# Altium schematic symbol library Capacitor.SchLib: 735 symbols (part 18 of 20)
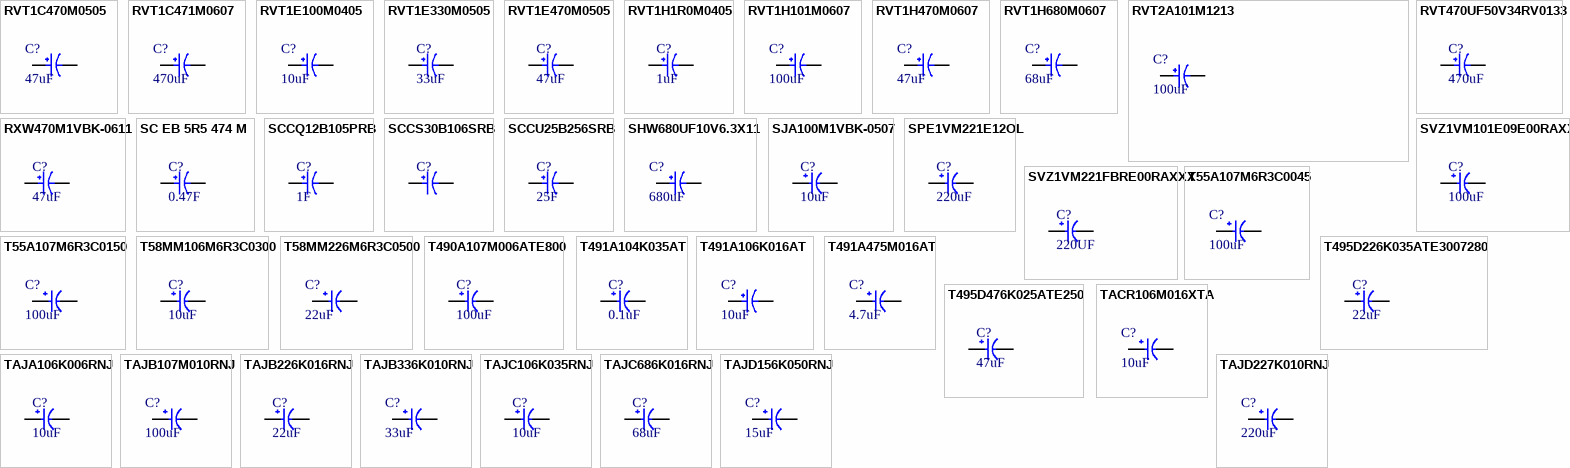
[diagram p35: symbols RVT1C470M0505 to TAJD227K010RNJ]

## SCCU25B256SRB
designator C?, comment 25F
CAP 25F -10% +30% 2.7V T/H; Manufacturer: Kyocera AVX; Manufacturer Part Number: SCCU25B256SRB; Tolerance: 30%; ESR (Equivalent Series Resistance): 27mR; Item Type: Supercapacitor; Supplier: Digikey; Supplier Part Number: 478-10018-ND; RoHS: Yes; Category: Capacitors; Stock: 10511; Pricing: 1=2.52, 10=1.937, 50=1.7798, 100=1.4758, 500=1.18656, 1000=1.03824, 2500=1.00116, 5000=0.96408 (USD); Mounting Technology: Through Hole; Case/Package: Radial; Min Operating Temperature: -40°C; Max Operating Temperature: 65°C; Packaging: Bulk; Value: 25F; Voltage Rating: 2.7V; Termination: PC Pins; Series: SCC; RoHS Compliant: Yes; ComponentLink1URL: http://datasheets.avx.com/AVX-SCC.pdf?src-supplier=Digikey; ComponentLink1Description: http://datasheets.avx.com/AVX-SCC.pdf?src-supplier=Digikey; ComponentLink2URL: https://datasheet.octopart.com/SCCU25B256SRB-KYOCERA-AVX-datasheet-157240974.pdf?src-supplier=TME; ComponentLink2Description: https://datasheet.octopart.com/SCCU25B256SRB-KYOCERA-AVX-datasheet-157240974.pdf?src-supplier=TME
footprint SCCU25B256SRB
pins: 1, 2

## SHW680UF10V6.3X11
designator C?, comment 680uF
680uF 10V 50mΩ@300kHz ±20% 980mA@100kHz Plugin,D6.3xL11mm Aluminum Electrolytic Capacitors - Leaded ROHS; Manufacturer: KNSCHA; Manufacturer Part Number: SHW680UF10V6.3X11; Package: Plugin,D6.3xL11mm; LCSC Part Number: C494547; Item Type: Electrolytic Capacitor; ComponentLink1Description: LCSC; ComponentLink1URL: https://www.lcsc.com/product-detail/Aluminum-Electrolytic-Capacitors-Leaded_KNSCHA-SHW680UF10V6-3X11_C494547.html
footprint SHW680UF10V6.3X11
pins: 1, 2

## SJA100M1VBK-0507
designator C?, comment 10uF
10uF 35V ±20% 30mA@120Hz Plugin,D5xL7mm Aluminum Electrolytic Capacitors - Leaded ROHS; Manufacturer: Lelon; Manufacturer Part Number: SJA100M1VBK-0507; Package: C134710; LCSC Part Number: Plugin,D5xL7mm; Item Type: Capacitor; ComponentLink1Description: LCSC; ComponentLink1URL: https://www.lcsc.com/product-detail/Aluminum-Electrolytic-Capacitors-Leaded_Lelon-SJA100M1VBK-0507_C134710.html
footprint SJA100M1VBK-0507
pins: 1, 2

## SPE1VM221E12OL
designator C?, comment 220uF
35V 220uF ±20% Plugin,D6.3xL12mm Polymer Aluminum Capacitors ROHS; Manufacturer: Yunxing; Manufacturer Part Number: SPE1VM221E12OL; Package: Plugin,D6.3xL12mm; LCSC Part Number: C698133; Item Type: Capacitor; ComponentLink1Description: LCSC; ComponentLink1URL: https://www.lcsc.com/product-detail/Polymer-Aluminum-Capacitors_Yunxing-SPE1VM221E12OL_C698133.html?s_z=n_SPE1VM221E12OL
footprint SPE1VM221E12OL
pins: 1, 2

## SVZ1VM101E09E00RAXXX
designator C?, comment 100uF
35V 100uF Polymer ±20% SMD,D6.3xL9mm Polymer Aluminum Capacitors ROHS; Manufacturer: KNSCHA; Manufacturer Part Number: SVZ1VM101E09E00RAXXX; Package: SMD,D6.3xL9mm; LCSC Part Number: C2939795; Item Type: Capacitor; ComponentLink1Description: LCSC; ComponentLink1URL: https://www.lcsc.com/product-detail/Polymer-Aluminum-Capacitors_AISHI-Aihua-Group-SVZ1VM101E09E00RAXXX_C2939795.html
footprint SVZ1VM101E09E00RAXXX
pins: 1, 2

## SVZ1VM221FBRE00RAXXX
designator C?, comment 220UF
35V 220uF ±20% 30mΩ@100kHz 2.4A@100kHz SMD,D8xL11.5mm Polymer Aluminum Capacitors ROHS; Manufacturer: KNSCHA; Manufacturer Part Number: SVZ1VM221FBRE00RAXXX; Package: SMD,D8xL11.5mm; LCSC Part Number: C2923769; Item Type: Capacitor; ComponentLink1Description: LCSC; ComponentLink1URL: https://www.lcsc.com/product-detail/Polymer-Aluminum-Capacitors_AISHI-Aihua-Group-SVZ1VM221FBRE00RAXXX_C2923769.html
footprint SVZ1VM221FBRE00RAXXX
pins: 1, 2

## T55A107M6R3C0045
designator C?, comment 100uF
CAP TANT POLY 100UF 6.3V 1206; Manufacturer: Vishay; Manufacturer Part Number: T55A107M6R3C0045; Item Type: Tantalum Capacitors; Supplier: Mouser; LCSC Part Number: C2158564; RoHS: Yes; Stock: 8813; Pricing: 1=0.87, 10=0.425, 50=0.425, 100=0.425, 1000=0.361, 10000=0.31 (USD); Voltage Rating (DC): 6.3V; ComponentLink1URL: http://www.farnell.com/datasheets/2896948.pdf?src-supplier=Farnell; ComponentLink1Description: http://www.farnell.com/datasheets/2896948.pdf?src-supplier=Farnell; ComponentLink2URL: https://datasheet.octopart.com/T55A107M6R3C0045-Vishay-datasheet-112277755.pdf?src-supplier=Newark; ComponentLink2Description: https://datasheet.octopart.com/T55A107M6R3C0045-Vishay-datasheet-112277755.pdf?src-supplier=Newark; ComponentLink3URL: https://datasheet.octopart.com/T55A107M6R3C0045-Vishay-datasheet-76796260.pdf?src-supplier=Element14; ComponentLink3Description: https://datasheet.octopart.com/T55A107M6R3C0045-Vishay-datasheet-76796260.pdf?src-supplier=Element14; ComponentLink4URL: http://www.farnell.com/datasheets/2896948.pdf?src-supplier=Newark; ComponentLink4Description: http://www.farnell.com/datasheets/2896948.pdf?src-supplier=Newark; ComponentLink5URL: https://datasheet.octopart.com/T55A107M6R3C0045-Vishay-datasheet-32736835.pdf?src-supplier=Future+Electronics; ComponentLink5Description: https://datasheet.octopart.com/T55A107M6R3C0045-Vishay-datasheet-32736835.pdf?src-supplier=Future+Electronics; ComponentLink6URL: http://www.vishay.com/docs/40174/t55.pdf?src-supplier=Digikey; ComponentLink6Description: http://www.vishay.com/docs/40174/t55.pdf?src-supplier=Digikey
footprint Case-A
pins: 1, 2

## T55A107M6R3C0150
designator C?, comment 100uF
CAP TANT POLY 100UF 6.3V 1206; Manufacturer: Vishay Sprague; Manufacturer Part Number: T55A107M6R3C0150; Item Type: Capacitor; Supplier: Digi-Key; Supplier Part Number: 718-1988-1-ND; RoHS: Yes; Category: Tantalum Capacitors; Stock: 2047; Pricing: 1=0.79, 10=0.583, 50=0.4664, 100=0.3997, 500=0.31644, 1000=0.26648 (USD); ComponentLink1URL: https://datasheet.ciiva.com/48510/t55-48510541.pdf?src-supplier=Avnet; ComponentLink1Description: https://datasheet.ciiva.com/48510/t55-48510541.pdf?src-supplier=Avnet; ComponentLink2URL: https://datasheet.ciiva.com/48510/t55-48510543.pdf?src-supplier=Avnet; ComponentLink2Description: https://datasheet.ciiva.com/48510/t55-48510543.pdf?src-supplier=Avnet; LCSC Part Number: C2158718
footprint Case-A
pins: 1, 2

## T58MM106M6R3C0300
designator C?, comment 10uF
CAP TANT POLY 10UF 6.3V 0603; Manufacturer: Vishay; Manufacturer Part Number: T58MM106M6R3C0300; ESR (Equivalent Series Resistance): 300mR; Tolerance: 20%; Item Type: Capacitor; Supplier: Digi-Key; Supplier Part Number: 718-2111-1-ND; RoHS: Yes; Category: Tantalum Capacitors; Stock: 738; Pricing: 1=0.69, 10=0.462, 50=0.3676, 100=0.3035, 500=0.23714, 1000=0.20158 (USD); Mounting Technology: Surface Mount; Case/Package: 0603; Case Code (Metric): 1608; Case Code (Imperial): 0603; Min Operating Temperature: -55°C; Max Operating Temperature: 105°C; Packaging: Cut Tape; Value: 10uF; Voltage Rating: 6.3V; Voltage Rating (DC): 6.3V; Features: General Purpose; Series: vPolyTan™ T58; Construction: Flat; Length: 1.6mm; Depth: 0.85mm; RoHS Compliant: Yes; Reach SVHC Compliant: Unknown; ComponentLink1URL: http://www.farnell.com/datasheets/2699706.pdf?src-supplier=Farnell; ComponentLink1Description: http://www.farnell.com/datasheets/2699706.pdf?src-supplier=Farnell; ComponentLink2URL: http://www.vishay.com/docs/40189/t58.pdf?src-supplier=Avnet; ComponentLink2Description: http://www.vishay.com/docs/40189/t58.pdf?src-supplier=Avnet; ComponentLink3URL: http://www.farnell.com/datasheets/2028130.pdf?src-supplier=Element14; ComponentLink3Description: http://www.farnell.com/datasheets/2028130.pdf?src-supplier=Element14; ComponentLink4URL: http://www.vishay.com/docs/40189/t58.pdf?src-supplier=Digi-Key; ComponentLink4Description: http://www.vishay.com/docs/40189/t58.pdf?src-supplier=Digi-Key; LCSC Part Number: C2158420
footprint Tant-0603
pins: 1, 2

## T58MM226M6R3C0500
designator C?, comment 22uF
CAP TANT POLY 22UF 6.3V 0603; Manufacturer: Vishay; Manufacturer Part Number: T58MM226M6R3C0500; Item Type: Capacitor; Supplier: Mouser; Supplier Part Number: 74-T58MM226M6R3C0500; RoHS: Yes; Category: Tantalum Capacitors; Stock: 4661; Pricing: 1=0.71, 10=0.379, 50=0.379, 100=0.313, 1000=0.208, 10000=0.168 (USD); ComponentLink1URL: http://www.farnell.com/datasheets/2617265.pdf?src-supplier=Farnell; ComponentLink1Description: http://www.farnell.com/datasheets/2617265.pdf?src-supplier=Farnell; ComponentLink2URL: https://datasheet.octopart.com/T58MM226M6R3C0500-Vishay-datasheet-78835337.pdf?src-supplier=Element14; ComponentLink2Description: https://datasheet.octopart.com/T58MM226M6R3C0500-Vishay-datasheet-78835337.pdf?src-supplier=Element14; ComponentLink3URL: https://datasheet.octopart.com/T58MM226M6R3C0500.-Vishay-datasheet-159617154.pdf?src-supplier=Newark; ComponentLink3Description: https://datasheet.octopart.com/T58MM226M6R3C0500.-Vishay-datasheet-159617154.pdf?src-supplier=Newark; ComponentLink4URL: http://www.farnell.com/datasheets/2617265.pdf?src-supplier=Newark; ComponentLink4Description: http://www.farnell.com/datasheets/2617265.pdf?src-supplier=Newark; ComponentLink5URL: http://www.vishay.com/docs/40189/t58.pdf?src-supplier=Avnet; ComponentLink5Description: http://www.vishay.com/docs/40189/t58.pdf?src-supplier=Avnet; ComponentLink6URL: https://datasheet.octopart.com/T58MM226M6R3C0500-Vishay-datasheet-95510002.pdf?src-supplier=Future+Electronics; ComponentLink6Description: https://datasheet.octopart.com/T58MM226M6R3C0500-Vishay-datasheet-95510002.pdf?src-supplier=Future+Electronics; ComponentLink7URL: https://www.vishay.com/docs/40189/t58.pdf?src-supplier=Digi-Key; ComponentLink7Description: https://www.vishay.com/docs/40189/t58.pdf?src-supplier=Digi-Key; Package: 0603; LCSC Part Number: C2158410; ComponentLink8Description: LCSC; ComponentLink8URL: https://www.lcsc.com/product-detail/Tantalum-Capacitors_Vishay-Intertech-T58MM226M6R3C0500_C2158410.html
footprint Tant-0603
pins: 1, 2

## T490A107M006ATE800
designator C?, comment 100uF
CAP TANT 100UF 20% 6V 1206; Manufacturer: KEMET; Manufacturer Part Number: T490A107M006ATE800; Item Type: Capacitors; ESR (Equivalent Series Resistance): 800mR; Voltage Rating: 6.3V; Supplier: Mouser; LCSC Part Number: C122251; RoHS: Yes; Stock: 905; Pricing: 1=0.7, 10=0.375, 50=0.375, 100=0.319, 1000=0.263, 10000=0.25 (USD); Mounting Technology: Surface Mount; Case/Package: 1206; Case Code (Imperial): 1206; Case Code (Metric): 3216; Min Operating Temperature: -55°C; Max Operating Temperature: 125°C; Packaging: Cut Tape; Value: 100uF; Tolerance: 20%; Features: General Purpose; Series: T490; Construction: Flat; Length: 3.2mm; Height: 1.6mm; RoHS Compliant: Yes; ComponentLink1URL: http://www.farnell.com/datasheets/2319485.pdf?src-supplier=Farnell; ComponentLink1Description: http://www.farnell.com/datasheets/2319485.pdf?src-supplier=Farnell; ComponentLink2URL: https://datasheet.octopart.com/T490A107M006ATE800-KEMET-datasheet-68586799.pdf?src-supplier=Newark; ComponentLink2Description: https://datasheet.octopart.com/T490A107M006ATE800-KEMET-datasheet-68586799.pdf?src-supplier=Newark; ComponentLink3URL: https://datasheet.octopart.com/T490A107M006ATE800-KEMET-datasheet-85394776.pdf?src-supplier=Element14; ComponentLink3Description: https://datasheet.octopart.com/T490A107M006ATE800-KEMET-datasheet-85394776.pdf?src-supplier=Element14; ComponentLink4URL: https://api.kemet.com/component-edge/download/datasheet/T490A107M006ATE800.pdf?src-supplier=Digikey; ComponentLink4Description: https://api.kemet.com/component-edge/download/datasheet/T490A107M006ATE800.pdf?src-supplier=Digikey; ComponentLink5URL: http://capacitoredge.kemet.com/capedge2/DataSheet/Datasheet-T490A107M006ATE800.pdf?pn=T490A107M006ATE800&src-supplier=Avnet; ComponentLink5Description: http://capacitoredge.kemet.com/capedge2/DataSheet/Datasheet-T490A107M006ATE800.pdf?pn=T490A107M006ATE800&src-supplier=Avnet; ComponentLink6URL: https://datasheet.octopart.com/T490A107M006ATE800-KEMET-datasheet-181972689.pdf?src-supplier=Farnell; ComponentLink6Description: https://datasheet.octopart.com/T490A107M006ATE800-KEMET-datasheet-181972689.pdf?src-supplier=Farnell
footprint Case-A
pins: 1, 2

## T491A104K035AT
designator C?, comment 0.1uF
CAP TANT 0.1UF 10% 35V 1206; Manufacturer: KEMET; Manufacturer Part Number: T491A104K035AT; Item Type: Capacitors; Supplier: Mouser; LCSC Part Number: C122257; RoHS: Yes; Stock: 108569; Pricing: 1=0.5, 10=0.331, 50=0.331, 100=0.189, 1000=0.137, 10000=0.107 (USD); Lead Free: 5697LeadFree; ComponentLink1URL: https://datasheet.ciiva.com/257/kem-t2005-t491-257575.pdf?src-supplier=Digikey; ComponentLink1Description: https://datasheet.ciiva.com/257/kem-t2005-t491-257575.pdf?src-supplier=Digikey; ComponentLink2URL: https://datasheet.ciiva.com/27052/1573142-27052555.pdf?src-supplier=Jameco; ComponentLink2Description: https://datasheet.ciiva.com/27052/1573142-27052555.pdf?src-supplier=Jameco; ComponentLink3URL: https://datasheet.ciiva.com/12911/kem-t2005-t491-12911563.pdf?src-supplier=Mouser; ComponentLink3Description: https://datasheet.ciiva.com/12911/kem-t2005-t491-12911563.pdf?src-supplier=Mouser; ComponentLink4URL: https://datasheet.ciiva.com/32431/t491serie-eng-tds-32431637.pdf?src-supplier=Distrelec; ComponentLink4Description: https://datasheet.ciiva.com/32431/t491serie-eng-tds-32431637.pdf?src-supplier=Distrelec; ComponentLink5URL: https://datasheet.ciiva.com/7758/1446014-7758872.pdf?src-supplier=Element14; ComponentLink5Description: https://datasheet.ciiva.com/7758/1446014-7758872.pdf?src-supplier=Element14; ComponentLink6URL: https://datasheet.ciiva.com/7758/1446014-7758873.pdf?src-supplier=Element14; ComponentLink6Description: https://datasheet.ciiva.com/7758/1446014-7758873.pdf?src-supplier=Element14; ComponentLink7URL: https://datasheet.ciiva.com/7758/1698764-7758874.pdf?src-supplier=Element14; ComponentLink7Description: https://datasheet.ciiva.com/7758/1698764-7758874.pdf?src-supplier=Element14; ComponentLink8URL: https://datasheet.ciiva.com/7758/1446014-7758875.pdf?src-supplier=Element14; ComponentLink8Description: https://datasheet.ciiva.com/7758/1446014-7758875.pdf?src-supplier=Element14; ComponentLink9URL: https://datasheet.ciiva.com/257/kem-t2005-t491-257576.pdf?src-supplier=Digikey; ComponentLink9Description: https://datasheet.ciiva.com/257/kem-t2005-t491-257576.pdf?src-supplier=Digikey; ComponentLink10URL: https://datasheet.ciiva.com/257/kem-t2005-t491-257577.pdf?src-supplier=Digikey; ComponentLink10Description: https://datasheet.ciiva.com/257/kem-t2005-t491-257577.pdf?src-supplier=Digikey; ComponentLink11URL: https://datasheet.ciiva.com/5933/1446014-5933342.pdf?src-supplier=Farnell; ComponentLink11Description: https://datasheet.ciiva.com/5933/1446014-5933342.pdf?src-supplier=Farnell; ComponentLink12URL: https://datasheet.ciiva.com/14593/70095774-14593438.pdf?src-supplier=Allied+Electronics; ComponentLink12Description: https://datasheet.ciiva.com/14593/70095774-14593438.pdf?src-supplier=Allied+Electronics
footprint Case-A
pins: 1, 2

## T491A106K016AT
designator C?, comment 10uF
CAP TANT 10UF 10% 16V 1206; Manufacturer: KEMET; Manufacturer Part Number: T491A106K016AT; Item Type: Capacitor; Supplier 1: Mouser; RoHS: Yes; Category: Tantalum Capacitors; Stock 1: 340138; Pricing 1: 1=0.34, 10=0.214, 50=0.214, 100=0.163, 1000=0.118, 10000=0.096 (USD); ComponentLink1URL: https://datasheet.ciiva.com/34302/1573257-34302505.pdf?src-supplier=Jameco; ComponentLink1Description: https://datasheet.ciiva.com/34302/1573257-34302505.pdf?src-supplier=Jameco; ComponentLink2URL: https://datasheet.ciiva.com/7696/1732745-7696294.pdf?src-supplier=Element14; ComponentLink2Description: https://datasheet.ciiva.com/7696/1732745-7696294.pdf?src-supplier=Element14; ComponentLink3URL: https://datasheet.ciiva.com/12882/kem-t2005-t491-12882730.pdf?src-supplier=Mouser; ComponentLink3Description: https://datasheet.ciiva.com/12882/kem-t2005-t491-12882730.pdf?src-supplier=Mouser; ComponentLink4URL: https://datasheet.ciiva.com/6248/kem-t2005-t491-6248087.pdf?src-supplier=Digi-Key; ComponentLink4Description: https://datasheet.ciiva.com/6248/kem-t2005-t491-6248087.pdf?src-supplier=Digi-Key; ComponentLink5URL: https://datasheet.ciiva.com/6248/kem-t2005-t491-6248088.pdf?src-supplier=Digi-Key; ComponentLink5Description: https://datasheet.ciiva.com/6248/kem-t2005-t491-6248088.pdf?src-supplier=Digi-Key; ComponentLink6URL: https://datasheet.ciiva.com/6248/kem-t2005-t491-6248089.pdf?src-supplier=Digi-Key; ComponentLink6Description: https://datasheet.ciiva.com/6248/kem-t2005-t491-6248089.pdf?src-supplier=Digi-Key; ComponentLink7URL: https://datasheet.ciiva.com/14113/t491serie-eng-tds-14113132.pdf?src-supplier=Distrelec; ComponentLink7Description: https://datasheet.ciiva.com/14113/t491serie-eng-tds-14113132.pdf?src-supplier=Distrelec; ComponentLink8URL: https://datasheet.ciiva.com/14605/70095774-14605543.pdf?src-supplier=Allied+Electronics; ComponentLink8Description: https://datasheet.ciiva.com/14605/70095774-14605543.pdf?src-supplier=Allied+Electronics; ComponentLink9URL: https://datasheet.ciiva.com/14586/70095774-14586694.pdf?src-supplier=Allied+Electronics; ComponentLink9Description: https://datasheet.ciiva.com/14586/70095774-14586694.pdf?src-supplier=Allied+Electronics; ComponentLink10URL: https://datasheet.ciiva.com/39123/kem-t2005-t491-39123278.pdf?src-supplier=Onlinecomponents.com; ComponentLink10Description: https://datasheet.ciiva.com/39123/kem-t2005-t491-39123278.pdf?src-supplier=Onlinecomponents.com; ComponentLink11URL: https://datasheet.ciiva.com/7696/1854511-7696293.pdf?src-supplier=Element14; ComponentLink11Description: https://datasheet.ciiva.com/7696/1854511-7696293.pdf?src-supplier=Element14; ComponentLink12URL: https://datasheet.ciiva.com/7696/1854511-7696295.pdf?src-supplier=Element14; ComponentLink12Description: https://datasheet.ciiva.com/7696/1854511-7696295.pdf?src-supplier=Element14; ComponentLink13URL: https://datasheet.ciiva.com/7696/1446014-7696296.pdf?src-supplier=Element14; ComponentLink13Description: https://datasheet.ciiva.com/7696/1446014-7696296.pdf?src-supplier=Element14; ComponentLink14URL: https://datasheet.ciiva.com/7696/1923792-7696431.pdf?src-supplier=Element14; ComponentLink14Description: https://datasheet.ciiva.com/7696/1923792-7696431.pdf?src-supplier=Element14; ComponentLink15URL: https://datasheet.ciiva.com/29244/458306-da-01-de-kondensator-10uf-3216-10pr-16v-85c-29244588.pdf?src-supplier=Conrad; ComponentLink15Description: https://datasheet.ciiva.com/29244/458306-da-01-de-kondensator-10uf-3216-10pr-16v-85c-29244588.pdf?src-supplier=Conrad; LCSC Part Number: C110055; Supplier Part Number 1: 80-T491A106K016
footprint Case-A
pins: 1, 2

## T491A475M016AT
designator C?, comment 4.7uF
CAP TANT 4.7UF 20% 16V 1206; Manufacturer: KEMET; Manufacturer Part Number: T491A475M016AT; ESR (Equivalent Series Resistance): 4R; Polarity: Polar; Dissipation Factor: 6%; Leakage Current: 800nA; Ripple Current: 137mA; Item Type: Capacitor; Supplier 1: Arrow Electronics; RoHS: Yes; Category: Tantalum Capacitors; Stock 1: 1126; Pricing 1: 1=0.4242, 10=0.2959, 25=0.293, 100=0.202, 250=0.2, 500=0.198, 1000=0.196 (USD); Mounting Technology: Surface Mount; Case/Package: 1206; Pins: 2; Case Code (Metric): 3216; Case Code (Imperial): 1206; Min Operating Temperature: -55°C; Max Operating Temperature: 125°C; Value: 4.7uF; Tolerance: 20%; Packaging: Tape and Reel; Voltage Rating: 16V; Series: T491; Termination: SMD/SMT; Package Quantity: 2000; Voltage Rating (DC): 16V; Construction: Flat; Features: General Purpose; Length: 3.2mm; Width: 1.6mm; Height: 1.8mm; Depth: 1.6mm; Radiation Hardening: No; RoHS Compliant: Yes; Lead Free: Lead Free; Reach SVHC Compliant: No; ComponentLink1URL: https://datasheet.ciiva.com/36526/1573441-36526016.pdf?src-supplier=Jameco; ComponentLink1Description: https://datasheet.ciiva.com/36526/1573441-36526016.pdf?src-supplier=Jameco; ComponentLink2URL: https://datasheet.ciiva.com/257/kem-t2005-t491-257539.pdf?src-supplier=Digi-Key; ComponentLink2Description: https://datasheet.ciiva.com/257/kem-t2005-t491-257539.pdf?src-supplier=Digi-Key; ComponentLink3URL: https://datasheet.ciiva.com/257/kem-t2005-t491-257540.pdf?src-supplier=Digi-Key; ComponentLink3Description: https://datasheet.ciiva.com/257/kem-t2005-t491-257540.pdf?src-supplier=Digi-Key; ComponentLink4URL: https://datasheet.ciiva.com/257/kem-t2005-t491-257541.pdf?src-supplier=Digi-Key; ComponentLink4Description: https://datasheet.ciiva.com/257/kem-t2005-t491-257541.pdf?src-supplier=Digi-Key; ComponentLink5URL: https://datasheet.ciiva.com/7696/kem-t2005-t491-7696437.pdf?src-supplier=Element14; ComponentLink5Description: https://datasheet.ciiva.com/7696/kem-t2005-t491-7696437.pdf?src-supplier=Element14; ComponentLink6URL: https://datasheet.ciiva.com/14113/t491serie-eng-tds-14113129.pdf?src-supplier=Distrelec; ComponentLink6Description: https://datasheet.ciiva.com/14113/t491serie-eng-tds-14113129.pdf?src-supplier=Distrelec; ComponentLink7URL: https://datasheet.ciiva.com/12911/kem-t2005-t491-12911054.pdf?src-supplier=Mouser; ComponentLink7Description: https://datasheet.ciiva.com/12911/kem-t2005-t491-12911054.pdf?src-supplier=Mouser; Supplier Part Number 1: T491A475M016AT; LCSC Part Number: C128253
footprint Case-A
pins: 1, 2

## T495D226K035ATE3007280
designator C?, comment 22uF
CAP TANT 22UF 10% 35V 2917; Manufacturer: KEMET; Manufacturer Part Number: T495D226K035ATE3007280; Item Type: Capacitor; ESR (Equivalent Series Resistance): 300mR; Polarity: Polar; Dissipation Factor: 6%; Supplier: Digikey; LCSC Part Number: C122326; RoHS: Yes; Pricing: 2500=0.57649 (USD); Case/Package: Molded; Min Operating Temperature: -55°C; Max Operating Temperature: 125°C; Value: 22uF; Tolerance: 10%; Packaging: Tape and Reel; Construction: Flat; Length: 7.3mm; Height: 2.8mm; Depth: 4.3mm; Radiation Hardening: No; RoHS Compliant: Yes; ComponentLink1URL: http://components.arrow.com/part/dataview/42155055S8669486N7429?src-supplier=Arrow+Electronics; ComponentLink1Description: http://components.arrow.com/part/dataview/42155055S8669486N7429?src-supplier=Arrow+Electronics; ComponentLink2URL: http://capacitoredge.kemet.com/capedge2/DataSheet?pn=T495D226K035ATE3007280&src-supplier=Avnet; ComponentLink2Description: http://capacitoredge.kemet.com/capedge2/DataSheet?pn=T495D226K035ATE3007280&src-supplier=Avnet
footprint Case-D
pins: 1, 2

## T495D476K025ATE250
designator C?, comment 47uF
CAP TANT 47UF 10% 25V 2917; Manufacturer: KEMET; Manufacturer Part Number: T495D476K025ATE250; Item Type: Capacitor; Supplier: Mouser; LCSC Part Number: C1952924; RoHS: Yes; Stock: 2198; Pricing: 1=1.82, 10=1.29, 50=1.29, 100=1.07, 1000=0.751, 10000=0.67 (USD); ComponentLink1URL: http://www.mouser.com/ds/2/212/KEM_T2071_T495_COTS-1104607.pdf?src-supplier=Mouser; ComponentLink1Description: http://www.mouser.com/ds/2/212/KEM_T2071_T495_COTS-1104607.pdf?src-supplier=Mouser; ComponentLink2URL: http://components.arrow.com/part/dataview/43511451S7939771N7429?src-supplier=Arrow+Electronics; ComponentLink2Description: http://components.arrow.com/part/dataview/43511451S7939771N7429?src-supplier=Arrow+Electronics; ComponentLink3URL: https://datasheet.octopart.com/T495D476K025ATE250-Kemet-datasheet-27203288.pdf?src-supplier=Element14; ComponentLink3Description: https://datasheet.octopart.com/T495D476K025ATE250-Kemet-datasheet-27203288.pdf?src-supplier=Element14; ComponentLink4URL: https://datasheet.octopart.com/T495D476K025ATE250-Kemet-datasheet-9873475.pdf?src-supplier=Newark; ComponentLink4Description: https://datasheet.octopart.com/T495D476K025ATE250-Kemet-datasheet-9873475.pdf?src-supplier=Newark; ComponentLink5URL: http://www.kemet.com/Lists/ProductCatalog/Attachments/261/KEM_T2009_T495.pdf?src-supplier=Avnet; ComponentLink5Description: http://www.kemet.com/Lists/ProductCatalog/Attachments/261/KEM_T2009_T495.pdf?src-supplier=Avnet; ComponentLink6URL: https://api.kemet.com/component-edge/download/datasheet/T495D476K025ATE250.pdf?src-supplier=Digikey; ComponentLink6Description: https://api.kemet.com/component-edge/download/datasheet/T495D476K025ATE250.pdf?src-supplier=Digikey; ComponentLink7URL: https://datasheet.octopart.com/T495D476K025ATE250-KEMET-datasheet-102476631.pdf?src-supplier=Farnell; ComponentLink7Description: https://datasheet.octopart.com/T495D476K025ATE250-KEMET-datasheet-102476631.pdf?src-supplier=Farnell; ComponentLink8URL: https://datasheet.octopart.com/T495D476K025ATE250-KEMET-datasheet-130110683.pdf?src-supplier=TME; ComponentLink8Description: https://datasheet.octopart.com/T495D476K025ATE250-KEMET-datasheet-130110683.pdf?src-supplier=TME
footprint Case-D
pins: 1, 2

## TACR106M016XTA
designator C?, comment 10uF
10uF 16V 5Ω ±20% 0805 Tantalum Capacitors ROHS; Manufacturer: Kyocera AVX; Manufacturer Part Number: TACR106M016XTA; Supplier: Rs; Supplier Part Number: 1441484; RoHS: Yes; Category: Tantalum Capacitors; Stock: 140; Pricing: 500=0.854 (GBP); ComponentLink1URL: https://datasheet.ciiva.com/11794/0900766b80f67b55-11794361.pdf?src-supplier=Rs; ComponentLink1Description: https://datasheet.ciiva.com/11794/0900766b80f67b55-11794361.pdf?src-supplier=Rs; ComponentLink2URL: https://datasheet.ciiva.com/265/tac-265202.pdf?src-supplier=Digi-Key; ComponentLink2Description: https://datasheet.ciiva.com/265/tac-265202.pdf?src-supplier=Digi-Key; ComponentLink3URL: https://datasheet.ciiva.com/265/tac-265203.pdf?src-supplier=Digi-Key; ComponentLink3Description: https://datasheet.ciiva.com/265/tac-265203.pdf?src-supplier=Digi-Key; ComponentLink4URL: https://datasheet.ciiva.com/265/tac-265204.pdf?src-supplier=Digi-Key; ComponentLink4Description: https://datasheet.ciiva.com/265/tac-265204.pdf?src-supplier=Digi-Key; ComponentLink5URL: https://datasheet.ciiva.com/16492/tac-16492598.pdf?src-supplier=Future+Electronics; ComponentLink5Description: https://datasheet.ciiva.com/16492/tac-16492598.pdf?src-supplier=Future+Electronics; ComponentLink6URL: https://datasheet.ciiva.com/12883/tac-12883807.pdf?src-supplier=Mouser; ComponentLink6Description: https://datasheet.ciiva.com/12883/tac-12883807.pdf?src-supplier=Mouser; ComponentLink7URL: https://datasheet.ciiva.com/7730/49917-7730699.pdf?src-supplier=Element14; ComponentLink7Description: https://datasheet.ciiva.com/7730/49917-7730699.pdf?src-supplier=Element14; ComponentLink8URL: https://datasheet.ciiva.com/7730/49917-7730700.pdf?src-supplier=Element14; ComponentLink8Description: https://datasheet.ciiva.com/7730/49917-7730700.pdf?src-supplier=Element14; ComponentLink9URL: https://datasheet.ciiva.com/11301/tac-11301081.pdf?src-supplier=Avnet; ComponentLink9Description: https://datasheet.ciiva.com/11301/tac-11301081.pdf?src-supplier=Avnet; Package: 0805; LCSC Part Number: C7357021; Item Type: Capacitor; ComponentLink10Description: LCSC; ComponentLink10URL: https://www.lcsc.com/product-detail/Tantalum-Capacitors_Kyocera-AVX-TACR106M016XTA_C7357021.html
footprint Tant-0805
pins: 1, 2

## TAJA106K006RNJ
designator C?, comment 10uF
CAP TANT 10UF 10% 6.3V 1206; Manufacturer: Kyocera AVX; Manufacturer Part Number: TAJA106K006RNJ; Item Type: Capacitors; Dielectric Material: Tantalum; Tolerance: 20%; ESR (Equivalent Series Resistance): 4R; Leakage Current: 600nA; Polarity: Polar; Dissipation Factor: 6%; Q Factor: 6; Life (Hours): 2000Hour; Ripple Current: 137mA; Supplier: Rs; LCSC Part Number: C99352; RoHS: Yes; Stock: 11700; Mounting Technology: Surface Mount,PCB; Case/Package: 1206; Case Code (Imperial): 1206; Case Code (Metric): 3216; Min Operating Temperature: -55°C; Max Operating Temperature: 125°C; Packaging: Tape and Reel; Value: 10uF; Voltage Rating: 6.3V; Voltage Rating (DC): 6.3V; Package Quantity: 2000; Termination: SMD/SMT; Voltage: 6.3V; Features: General Purpose; Series: TAJ; Construction: Flat; Voltage Rating (AC): 6.3V; Length: 3.2mm; Width: 1.6mm; Height: 1.6mm; Depth: 1.6mm; Radiation Hardening: No; Reach SVHC Compliant: No; Lead Free: Lead Free; RoHS Compliant: Yes; ComponentLink1URL: https://datasheet.ciiva.com/11793/0900766b80ccdc61-11793223.pdf?src-supplier=Rs; ComponentLink1Description: https://datasheet.ciiva.com/11793/0900766b80ccdc61-11793223.pdf?src-supplier=Rs; ComponentLink2URL: https://datasheet.ciiva.com/263/taj-263371.pdf?src-supplier=Digikey; ComponentLink2Description: https://datasheet.ciiva.com/263/taj-263371.pdf?src-supplier=Digikey; ComponentLink3URL: https://datasheet.ciiva.com/263/taj-263370.pdf?src-supplier=Digikey; ComponentLink3Description: https://datasheet.ciiva.com/263/taj-263370.pdf?src-supplier=Digikey; ComponentLink4URL: https://datasheet.ciiva.com/263/taj-263372.pdf?src-supplier=Digikey; ComponentLink4Description: https://datasheet.ciiva.com/263/taj-263372.pdf?src-supplier=Digikey; ComponentLink5URL: https://datasheet.ciiva.com/12882/taj-27497-12882838.pdf?src-supplier=Mouser; ComponentLink5Description: https://datasheet.ciiva.com/12882/taj-27497-12882838.pdf?src-supplier=Mouser; ComponentLink6URL: https://datasheet.ciiva.com/14590/70001050-14590668.pdf?src-supplier=Allied+Electronics; ComponentLink6Description: https://datasheet.ciiva.com/14590/70001050-14590668.pdf?src-supplier=Allied+Electronics; ComponentLink7URL: https://datasheet.ciiva.com/3004/taj-3004383.pdf?src-supplier=Avnet; ComponentLink7Description: https://datasheet.ciiva.com/3004/taj-3004383.pdf?src-supplier=Avnet; ComponentLink8URL: https://datasheet.ciiva.com/16201/taj-16201592.pdf?src-supplier=Future+Electronics; ComponentLink8Description: https://datasheet.ciiva.com/16201/taj-16201592.pdf?src-supplier=Future+Electronics; ComponentLink9URL: https://datasheet.ciiva.com/3004/taj-3004384.pdf?src-supplier=Avnet; ComponentLink9Description: https://datasheet.ciiva.com/3004/taj-3004384.pdf?src-supplier=Avnet
footprint Case-A
pins: 1, 2

## TAJB107M010RNJ
designator C?, comment 100uF
CAP TANT 100UF 20% 10V 1411; Manufacturer: Kyocera AVX; Manufacturer Part Number: TAJB107M010RNJ; Dielectric Material: Tantalum; Tolerance: 10%; ESR (Equivalent Series Resistance): 1.4R; Leakage Current: 10uA; Dissipation Factor: 8%; Item Type: Capacitor; Supplier 1: Rs; RoHS: Yes; Category: Tantalum Capacitors; Stock 1: 17520; Pricing 1: 2000=0.302 (GBP); Mounting Technology: Surface Mount; Case/Package: 1210; Case Code (Imperial): 1210; Case Code (Metric): 3528; Min Operating Temperature: -55°C; Max Operating Temperature: 125°C; Value: 100uF; Voltage Rating (DC): 10V; Series: TAJ; Construction: Flat; Voltage Rating: 10V; Package Quantity: 2000; Packaging: Tape and Reel; Termination: SMD/SMT; Voltage: 10V; Features: General Purpose; Length: 3.5mm; Width: 2.8mm; Height: 2.1mm; Depth: 2.8mm; Radiation Hardening: No; Lead Free: Lead Free; RoHS Compliant: Yes; Reach SVHC Compliant: No; ComponentLink1URL: https://datasheet.ciiva.com/264/taj-264281.pdf?src-supplier=Digi-Key; ComponentLink1Description: https://datasheet.ciiva.com/264/taj-264281.pdf?src-supplier=Digi-Key; ComponentLink2URL: https://datasheet.ciiva.com/264/taj-264280.pdf?src-supplier=Digi-Key; ComponentLink2Description: https://datasheet.ciiva.com/264/taj-264280.pdf?src-supplier=Digi-Key; ComponentLink3URL: https://datasheet.ciiva.com/264/taj-264282.pdf?src-supplier=Digi-Key; ComponentLink3Description: https://datasheet.ciiva.com/264/taj-264282.pdf?src-supplier=Digi-Key; ComponentLink4URL: https://datasheet.ciiva.com/11225/taj-11225964.pdf?src-supplier=Avnet; ComponentLink4Description: https://datasheet.ciiva.com/11225/taj-11225964.pdf?src-supplier=Avnet; ComponentLink5URL: https://datasheet.ciiva.com/11225/taj-11225963.pdf?src-supplier=Avnet; ComponentLink5Description: https://datasheet.ciiva.com/11225/taj-11225963.pdf?src-supplier=Avnet; Supplier Part Number 1: 1354069; LCSC Part Number: C7196
footprint Case-B
pins: 1, 2

## TAJB226K016RNJ
designator C?, comment 22uF
CAP TANT 22UF 10% 16V 1411; Manufacturer: Kyocera AVX; Manufacturer Part Number: TAJB226K016RNJ; Item Type: Tantalum Capacitor; Package: CASE-B-3528; LCSC Part Number: C8020; ComponentLink1Description: LCSC; ComponentLink1URL: https://www.lcsc.com/product-detail/Tantalum-Capacitors_Kyocera-AVX-TAJB226K016RNJ_C8020.html
footprint Case-B
pins: 1, 2

## TAJB336K010RNJ
designator C?, comment 33uF
CAP TANT 33UF 10% 10V 1411; Manufacturer: Kyocera AVX; Manufacturer Part Number: TAJB336K010RNJ; Dielectric Material: Tantalum; ESR (Equivalent Series Resistance): 1.8R; Leakage Current: 3.3uA; Polarity: Polar; Dissipation Factor: 6%; Item Type: Capacitor; Supplier 1: Rs; RoHS: Yes; Category: Tantalum Capacitors; Stock 1: 1580; Pricing 1: 100=0.01410, 400=0.24800, 1000=0.21600 (GBP); Mounting Technology: Surface Mount,PCB; Case/Package: 1210; Pins: 2; Case Code (Metric): 3528; Case Code (Imperial): 1210; Min Operating Temperature: -55°C; Max Operating Temperature: 125°C; Tolerance: 10%; Value: 33uF; Packaging: Tape and Reel; Voltage Rating: 10V; Voltage Rating (DC): 10V; Package Quantity: 1; Termination: SMD/SMT; Voltage: 10V; Features: General Purpose; Series: TAJ; Construction: Flat; Length: 3.5mm; Width: 2.8mm; Height: 1.9mm; Height - Seated (Max): 0.083inch; Depth: 2.8mm; Lead Pitch: 1.4mm; Radiation Hardening: No; Reach SVHC Compliant: Yes; Lead Free: Lead Free; RoHS Compliant: Yes; ComponentLink1URL: https://datasheet.ciiva.com/26341/559435-da-01-en-tacc-b-3-2-mm-x-2-5-mm-x-1-9-mm-33-uf-26341776.pdf?src-supplier=Conrad; ComponentLink1Description: https://datasheet.ciiva.com/26341/559435-da-01-en-tacc-b-3-2-mm-x-2-5-mm-x-1-9-mm-33-uf-26341776.pdf?src-supplier=Conrad; ComponentLink2URL: https://datasheet.ciiva.com/7775/49917-7775706.pdf?src-supplier=Element14; ComponentLink2Description: https://datasheet.ciiva.com/7775/49917-7775706.pdf?src-supplier=Element14; ComponentLink3URL: https://datasheet.ciiva.com/7775/49917-7775705.pdf?src-supplier=Element14; ComponentLink3Description: https://datasheet.ciiva.com/7775/49917-7775705.pdf?src-supplier=Element14; ComponentLink4URL: https://datasheet.ciiva.com/7775/1680476-7775704.pdf?src-supplier=Element14; ComponentLink4Description: https://datasheet.ciiva.com/7775/1680476-7775704.pdf?src-supplier=Element14; ComponentLink5URL: https://datasheet.ciiva.com/264/taj-264134.pdf?src-supplier=Digi-Key; ComponentLink5Description: https://datasheet.ciiva.com/264/taj-264134.pdf?src-supplier=Digi-Key; ComponentLink6URL: https://datasheet.ciiva.com/264/taj-264133.pdf?src-supplier=Digi-Key; ComponentLink6Description: https://datasheet.ciiva.com/264/taj-264133.pdf?src-supplier=Digi-Key; ComponentLink7URL: https://datasheet.ciiva.com/264/taj-264135.pdf?src-supplier=Digi-Key; ComponentLink7Description: https://datasheet.ciiva.com/264/taj-264135.pdf?src-supplier=Digi-Key; ComponentLink8URL: https://datasheet.ciiva.com/12884/taj-27497-12884279.pdf?src-supplier=Mouser; ComponentLink8Description: https://datasheet.ciiva.com/12884/taj-27497-12884279.pdf?src-supplier=Mouser; ComponentLink9URL: https://datasheet.ciiva.com/14590/70001050-14590215.pdf?src-supplier=Allied+Electronics; ComponentLink9Description: https://datasheet.ciiva.com/14590/70001050-14590215.pdf?src-supplier=Allied+Electronics; ComponentLink10URL: https://datasheet.ciiva.com/14592/70001050-14592670.pdf?src-supplier=Allied+Electronics; ComponentLink10Description: https://datasheet.ciiva.com/14592/70001050-14592670.pdf?src-supplier=Allied+Electronics; ComponentLink11URL: https://datasheet.ciiva.com/11224/taj-11224937.pdf?src-supplier=Avnet; ComponentLink11Description: https://datasheet.ciiva.com/11224/taj-11224937.pdf?src-supplier=Avnet; ComponentLink12URL: https://datasheet.ciiva.com/16492/taj-16492863.pdf?src-supplier=Future+Electronics; ComponentLink12Description: https://datasheet.ciiva.com/16492/taj-16492863.pdf?src-supplier=Future+Electronics; ComponentLink13URL: https://datasheet.ciiva.com/11224/taj-11224941.pdf?src-supplier=Avnet; ComponentLink13Description: https://datasheet.ciiva.com/11224/taj-11224941.pdf?src-supplier=Avnet; Supplier Part Number 1: 1364604P; LCSC Part Number: C7202
footprint Case-B
pins: 1, 2

## TAJC106K035RNJ
designator C?, comment 10uF
CAP TANT 10UF 10% 35V 2312; Manufacturer: Kyocera AVX; Manufacturer Part Number: TAJC106K035RNJ; Item Type: Tantalum Capacitors; Dielectric Material: Tantalum; Tolerance: 20%; ESR (Equivalent Series Resistance): 1.6R; Leakage Current: 3.5uA; Polarity: Polar; Voltage: 25V; Dissipation Factor: 6%; Life (Hours): 2000Hour; Ripple Current: 262mA; Supplier: Avnet; Supplier Part Number: TAJC106K035RNJ; RoHS: Yes; Stock: 20000; Pricing: 500=0.4611, 1000=0.4505, 2000=0.4399, 3000=0.4293, 4000=0.4187, 5000=0.4081, 50000=0.4028 (USD); Mounting Technology: Surface Mount,PCB; Case/Package: Molded; Pins: 2; Case Code (Imperial): 2312; Case Code (Metric): 6032; Min Operating Temperature: -55°C; Max Operating Temperature: 125°C; Value: 10uF; Voltage Rating (DC): 35V; Voltage Rating: 35V; Features: General Purpose; Series: TAJ; Packaging: Tape and Reel; Package Quantity: 500; Termination: SMD/SMT; Construction: Flat; Length: 6mm; Width: 3.2mm; Height: 2.6mm; Depth: 3.2mm; Radiation Hardening: No; Lead Free: Lead Free; RoHS Compliant: Yes; Reach SVHC Compliant: No; ComponentLink1URL: https://datasheet.ciiva.com/11793/0900766b80ccdc61-11793205.pdf?src-supplier=Rs; ComponentLink1Description: https://datasheet.ciiva.com/11793/0900766b80ccdc61-11793205.pdf?src-supplier=Rs; ComponentLink2URL: https://datasheet.ciiva.com/26341/559442-da-01-en-tacc-c-6-0-mm-x-3-2-mm-x-2-6-mm-10-uf-26341782.pdf?src-supplier=Conrad; ComponentLink2Description: https://datasheet.ciiva.com/26341/559442-da-01-en-tacc-c-6-0-mm-x-3-2-mm-x-2-6-mm-10-uf-26341782.pdf?src-supplier=Conrad; ComponentLink3URL: https://datasheet.ciiva.com/5937/taj-5937099.pdf?src-supplier=Farnell; ComponentLink3Description: https://datasheet.ciiva.com/5937/taj-5937099.pdf?src-supplier=Farnell; ComponentLink4URL: https://datasheet.ciiva.com/7730/taj-7730983.pdf?src-supplier=Element14; ComponentLink4Description: https://datasheet.ciiva.com/7730/taj-7730983.pdf?src-supplier=Element14; ComponentLink5URL: https://datasheet.ciiva.com/7730/1703059-7730751.pdf?src-supplier=Element14; ComponentLink5Description: https://datasheet.ciiva.com/7730/1703059-7730751.pdf?src-supplier=Element14; ComponentLink6URL: https://datasheet.ciiva.com/7730/1703059-7730750.pdf?src-supplier=Element14; ComponentLink6Description: https://datasheet.ciiva.com/7730/1703059-7730750.pdf?src-supplier=Element14; ComponentLink7URL: https://datasheet.ciiva.com/7730/1680476-7730748.pdf?src-supplier=Element14; ComponentLink7Description: https://datasheet.ciiva.com/7730/1680476-7730748.pdf?src-supplier=Element14; ComponentLink8URL: https://datasheet.ciiva.com/7730/13070-7730749.pdf?src-supplier=Element14; ComponentLink8Description: https://datasheet.ciiva.com/7730/13070-7730749.pdf?src-supplier=Element14; ComponentLink9URL: https://datasheet.ciiva.com/264/taj-264350.pdf?src-supplier=Digikey; ComponentLink9Description: https://datasheet.ciiva.com/264/taj-264350.pdf?src-supplier=Digikey; ComponentLink10URL: https://datasheet.ciiva.com/264/taj-264349.pdf?src-supplier=Digikey; ComponentLink10Description: https://datasheet.ciiva.com/264/taj-264349.pdf?src-supplier=Digikey; ComponentLink11URL: https://datasheet.ciiva.com/264/taj-264351.pdf?src-supplier=Digikey; ComponentLink11Description: https://datasheet.ciiva.com/264/taj-264351.pdf?src-supplier=Digikey; ComponentLink12URL: https://datasheet.ciiva.com/12911/taj-27497-12911561.pdf?src-supplier=Mouser; ComponentLink12Description: https://datasheet.ciiva.com/12911/taj-27497-12911561.pdf?src-supplier=Mouser; ComponentLink13URL: https://datasheet.ciiva.com/14590/70001050-14590313.pdf?src-supplier=Allied+Electronics; ComponentLink13Description: https://datasheet.ciiva.com/14590/70001050-14590313.pdf?src-supplier=Allied+Electronics; ComponentLink14URL: https://datasheet.ciiva.com/3004/taj-3004476.pdf?src-supplier=Avnet; ComponentLink14Description: https://datasheet.ciiva.com/3004/taj-3004476.pdf?src-supplier=Avnet; ComponentLink15URL: https://datasheet.ciiva.com/15163/getdatasheetpartid-110753-15163367.pdf?src-supplier=Verical; ComponentLink15Description: https://datasheet.ciiva.com/15163/getdatasheetpartid-110753-15163367.pdf?src-supplier=Verical; ComponentLink16URL: https://datasheet.ciiva.com/3004/taj-3004475.pdf?src-supplier=Avnet; ComponentLink16Description: https://datasheet.ciiva.com/3004/taj-3004475.pdf?src-supplier=Avnet; LCSC Part Number: C7211
footprint Case-C
pins: 1, 2

## TAJC686K016RNJ
designator C?, comment 68uF
CAP TANT 68UF 10% 16V 2312; Manufacturer: Kyocera AVX; Manufacturer Part Number: TAJC686K016RNJ; Item Type: Capacitors; Dielectric Material: Tantalum; ESR (Equivalent Series Resistance): 1.3R; Voltage Rating (DC): 16.3V; Leakage Current: 10.9uA; Polarity: Polar; Dissipation Factor: 6%; Supplier: Digikey; LCSC Part Number: C7220; RoHS: Yes; Stock: 888; Pricing: 1=1.06, 10=0.729, 50=0.581, 100=0.5317 (USD); Mounting Technology: Surface Mount; Case/Package: Molded; Pins: 2; Case Code (Imperial): 2312; Case Code (Metric): 6032; Min Operating Temperature: -55°C; Max Operating Temperature: 125°C; Value: 68uF; Tolerance: 10%; Packaging: Tape and Reel; Voltage Rating: 16V; Package Quantity: 1; Termination: SMD/SMT; Voltage: 16V; Features: General Purpose; Series: TAJ; Length: 6mm; Width: 3.2mm; Height: 2.6mm; Height - Seated (Max): 0.11inch; Depth: 3.2mm; Radiation Hardening: No; Reach SVHC Compliant: No; Lead Free: Lead Free; RoHS Compliant: Yes; ComponentLink1URL: https://datasheet.ciiva.com/11794/0900766b802e69d0-11794413.pdf?src-supplier=Rs; ComponentLink1Description: https://datasheet.ciiva.com/11794/0900766b802e69d0-11794413.pdf?src-supplier=Rs; ComponentLink2URL: https://datasheet.ciiva.com/7864/1680476-7864538.pdf?src-supplier=Element14; ComponentLink2Description: https://datasheet.ciiva.com/7864/1680476-7864538.pdf?src-supplier=Element14; ComponentLink3URL: https://datasheet.ciiva.com/7864/1680476-7864539.pdf?src-supplier=Element14; ComponentLink3Description: https://datasheet.ciiva.com/7864/1680476-7864539.pdf?src-supplier=Element14; ComponentLink4URL: https://datasheet.ciiva.com/7864/1680476-7864537.pdf?src-supplier=Element14; ComponentLink4Description: https://datasheet.ciiva.com/7864/1680476-7864537.pdf?src-supplier=Element14; ComponentLink5URL: https://datasheet.ciiva.com/28577/taj-28577855.pdf?src-supplier=Element14; ComponentLink5Description: https://datasheet.ciiva.com/28577/taj-28577855.pdf?src-supplier=Element14; ComponentLink6URL: https://datasheet.ciiva.com/264/taj-264443.pdf?src-supplier=Digikey; ComponentLink6Description: https://datasheet.ciiva.com/264/taj-264443.pdf?src-supplier=Digikey; ComponentLink7URL: https://datasheet.ciiva.com/264/taj-264442.pdf?src-supplier=Digikey; ComponentLink7Description: https://datasheet.ciiva.com/264/taj-264442.pdf?src-supplier=Digikey; ComponentLink8URL: https://datasheet.ciiva.com/264/taj-264444.pdf?src-supplier=Digikey; ComponentLink8Description: https://datasheet.ciiva.com/264/taj-264444.pdf?src-supplier=Digikey; ComponentLink9URL: https://datasheet.ciiva.com/12883/taj-27497-12883640.pdf?src-supplier=Mouser; ComponentLink9Description: https://datasheet.ciiva.com/12883/taj-27497-12883640.pdf?src-supplier=Mouser; ComponentLink10URL: https://datasheet.ciiva.com/11225/taj-11225965.pdf?src-supplier=Avnet; ComponentLink10Description: https://datasheet.ciiva.com/11225/taj-11225965.pdf?src-supplier=Avnet; ComponentLink11URL: https://datasheet.ciiva.com/16298/taj-16298458.pdf?src-supplier=Future+Electronics; ComponentLink11Description: https://datasheet.ciiva.com/16298/taj-16298458.pdf?src-supplier=Future+Electronics; ComponentLink12URL: https://datasheet.ciiva.com/15163/getdatasheetpartid-41779-15163003.pdf?src-supplier=Verical; ComponentLink12Description: https://datasheet.ciiva.com/15163/getdatasheetpartid-41779-15163003.pdf?src-supplier=Verical
footprint Case-C
pins: 1, 2

## TAJD156K050RNJ
designator C?, comment 15uF
CAP TANT 15UF 10% 50V 2917; Manufacturer: Kyocera AVX; Manufacturer Part Number: TAJD156K050RNJ; Dielectric Material: Tantalum; ESR (Equivalent Series Resistance): 600mR; Leakage Current: 7.5uA; Dissipation Factor: 6%; Item Type: Capacitor; Supplier 1: Rs; RoHS: Yes; Category: Tantalum Capacitors; Stock 1: 712; Pricing 1: 500=1.59 (GBP); Mounting Technology: Surface Mount; Case/Package: 2917; Case Code (Metric): 7343; Case Code (Imperial): 2917; Min Operating Temperature: -55°C; Max Operating Temperature: 125°C; Value: 15uF; Tolerance: 10%; Voltage Rating: 50V; Packaging: Tape and Reel; Package Quantity: 500; Termination: SMD/SMT; Features: General Purpose; Series: TAJ; Construction: Flat; Length: 7.3mm; Width: 4.3mm; Height: 3.1mm; Height - Seated (Max): 0.122inch; Depth: 4.3mm; Lead Pitch: 4.4mm; Radiation Hardening: No; Reach SVHC Compliant: No; Lead Free: Lead Free; RoHS Compliant: Yes; ComponentLink1URL: https://datasheet.ciiva.com/7914/1680476-7914621.pdf?src-supplier=Element14; ComponentLink1Description: https://datasheet.ciiva.com/7914/1680476-7914621.pdf?src-supplier=Element14; ComponentLink2URL: https://datasheet.ciiva.com/7914/1680476-7914620.pdf?src-supplier=Element14; ComponentLink2Description: https://datasheet.ciiva.com/7914/1680476-7914620.pdf?src-supplier=Element14; ComponentLink3URL: https://datasheet.ciiva.com/7914/1826076-7914622.pdf?src-supplier=Element14; ComponentLink3Description: https://datasheet.ciiva.com/7914/1826076-7914622.pdf?src-supplier=Element14; ComponentLink4URL: https://datasheet.ciiva.com/29500/taj-29500328.pdf?src-supplier=Digi-Key; ComponentLink4Description: https://datasheet.ciiva.com/29500/taj-29500328.pdf?src-supplier=Digi-Key; ComponentLink5URL: https://datasheet.ciiva.com/29500/taj-29500327.pdf?src-supplier=Digi-Key; ComponentLink5Description: https://datasheet.ciiva.com/29500/taj-29500327.pdf?src-supplier=Digi-Key; ComponentLink6URL: https://datasheet.ciiva.com/29500/taj-29500329.pdf?src-supplier=Digi-Key; ComponentLink6Description: https://datasheet.ciiva.com/29500/taj-29500329.pdf?src-supplier=Digi-Key; ComponentLink7URL: https://datasheet.ciiva.com/12884/taj-27497-12884462.pdf?src-supplier=Mouser; ComponentLink7Description: https://datasheet.ciiva.com/12884/taj-27497-12884462.pdf?src-supplier=Mouser; ComponentLink8URL: https://datasheet.ciiva.com/11229/taj-11229647.pdf?src-supplier=Avnet; ComponentLink8Description: https://datasheet.ciiva.com/11229/taj-11229647.pdf?src-supplier=Avnet; ComponentLink9URL: https://datasheet.ciiva.com/16492/taj-16492939.pdf?src-supplier=Future+Electronics; ComponentLink9Description: https://datasheet.ciiva.com/16492/taj-16492939.pdf?src-supplier=Future+Electronics; Supplier Part Number 1: 1360323; LCSC Part Number: C308932
footprint Case-D
pins: 1, 2

## TAJD227K010RNJ
designator C?, comment 220uF
CAP TANT 220UF 10% 10V 2917; Manufacturer: Kyocera AVX; Manufacturer Part Number: TAJD227K010RNJ; Item Type: Capacitor; Supplier: Rs; Supplier Part Number: 1349925; RoHS: Yes; Category: Tantalum Capacitors; Stock: 100; Pricing: 500=0.553, 2500=0.537, 5000=0.523 (GBP); ComponentLink1URL: https://datasheet.ciiva.com/11793/0900766b80ccdc61-11793083.pdf?src-supplier=Rs; ComponentLink1Description: https://datasheet.ciiva.com/11793/0900766b80ccdc61-11793083.pdf?src-supplier=Rs; ComponentLink2URL: https://datasheet.ciiva.com/3004/taj-3004530.pdf?src-supplier=Avnet; ComponentLink2Description: https://datasheet.ciiva.com/3004/taj-3004530.pdf?src-supplier=Avnet; ComponentLink3URL: https://datasheet.ciiva.com/3004/taj-3004531.pdf?src-supplier=Avnet; ComponentLink3Description: https://datasheet.ciiva.com/3004/taj-3004531.pdf?src-supplier=Avnet; ComponentLink4URL: https://datasheet.ciiva.com/264/taj-264391.pdf?src-supplier=Digi-Key; ComponentLink4Description: https://datasheet.ciiva.com/264/taj-264391.pdf?src-supplier=Digi-Key; ComponentLink5URL: https://datasheet.ciiva.com/264/taj-264392.pdf?src-supplier=Digi-Key; ComponentLink5Description: https://datasheet.ciiva.com/264/taj-264392.pdf?src-supplier=Digi-Key; ComponentLink6URL: https://datasheet.ciiva.com/264/taj-264393.pdf?src-supplier=Digi-Key; ComponentLink6Description: https://datasheet.ciiva.com/264/taj-264393.pdf?src-supplier=Digi-Key; ComponentLink7URL: https://datasheet.ciiva.com/15163/getdatasheetpartid-121064-15163429.pdf?src-supplier=Verical; ComponentLink7Description: https://datasheet.ciiva.com/15163/getdatasheetpartid-121064-15163429.pdf?src-supplier=Verical; ComponentLink8URL: https://datasheet.ciiva.com/16201/taj-16201535.pdf?src-supplier=Future+Electronics; ComponentLink8Description: https://datasheet.ciiva.com/16201/taj-16201535.pdf?src-supplier=Future+Electronics; LCSC Part Number: C8024
footprint Case-D
pins: 1, 2

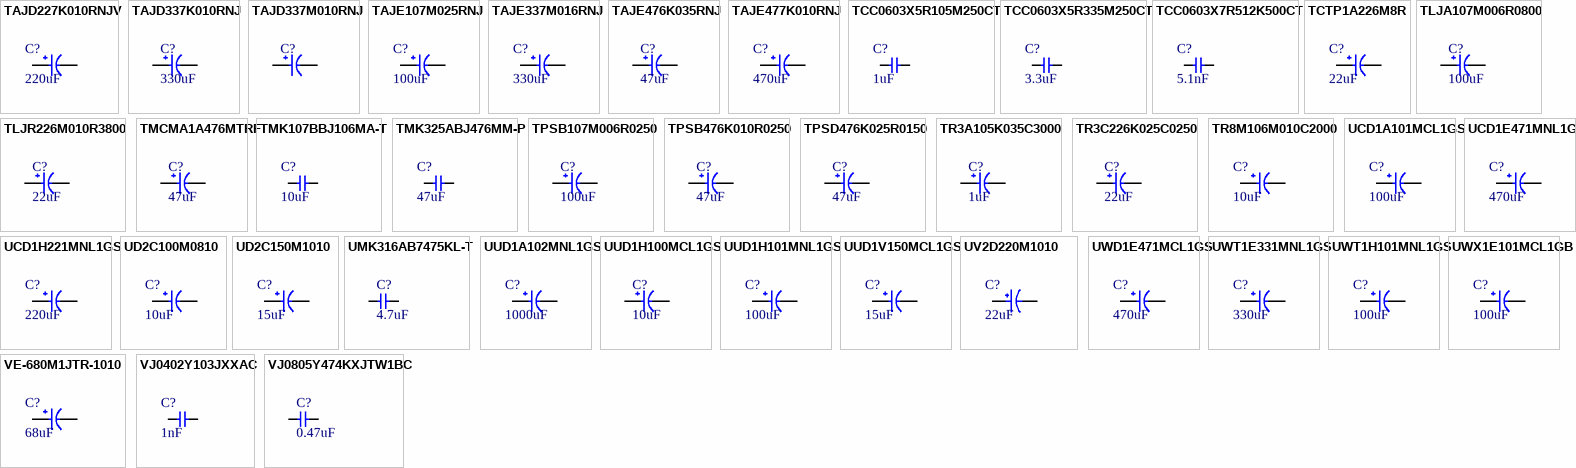
[diagram p17: symbols TAJD227K010RNJV to VJ0805Y474KXJTW1BC]

## TAJD227K010RNJV
designator C?, comment 220uF
CAP TANT 220UF 10% 10V 2917; Manufacturer: Kyocera AVX; Manufacturer Part Number: TAJD227K010RNJV; ESR (Equivalent Series Resistance): 500mR; Leakage Current: 22uA; Polarity: Polar; Dissipation Factor: 8%; Item Type: Capacitor; Supplier: Mouser; Supplier Part Number: 581-TAJD227K010RNJV; RoHS: Yes; Category: Tantalum Capacitors; Stock: 2881; Pricing: 1=1.15, 10=1.04, 50=1.04, 100=1.04, 1000=0.451, 10000=0.395 (USD); Case/Package: Molded; Case Code (Imperial): 2917; Case Code (Metric): 7343; Min Operating Temperature: -55°C; Max Operating Temperature: 125°C; Package Quantity: 500; Packaging: Tape and Reel; Series: TAJ; Voltage Rating: 10V; Tolerance: 10%; Value: 220uF; Termination: SMD/SMT; Voltage Rating (DC): 10V; Construction: Flat; Length: 7.3mm; Width: 4.3mm; Height: 3.1mm; Depth: 4.3mm; Radiation Hardening: No; RoHS Compliant: Yes; Lead Free: Lead Free; ComponentLink1URL: https://datasheet.ciiva.com/12887/taj-27497-12887958.pdf?src-supplier=Mouser; ComponentLink1Description: https://datasheet.ciiva.com/12887/taj-27497-12887958.pdf?src-supplier=Mouser; ComponentLink2URL: https://datasheet.ciiva.com/11229/taj-11229592.pdf?src-supplier=Avnet; ComponentLink2Description: https://datasheet.ciiva.com/11229/taj-11229592.pdf?src-supplier=Avnet; LCSC Part Number: C8024
footprint Case-D
pins: 1, 2